# Altium footprint library 4764.PcbLib: 1 footprints
Each footprint in its own frame and in the unit in brackets; x right, y up, seen from the top. Pads: shape width x height; smd on the part's side, far side on the other; paste and mask are expansions set on the pad; w line width, h text height; cw(c..) or ccw(c..) is an arc to the next point about the centre after c.
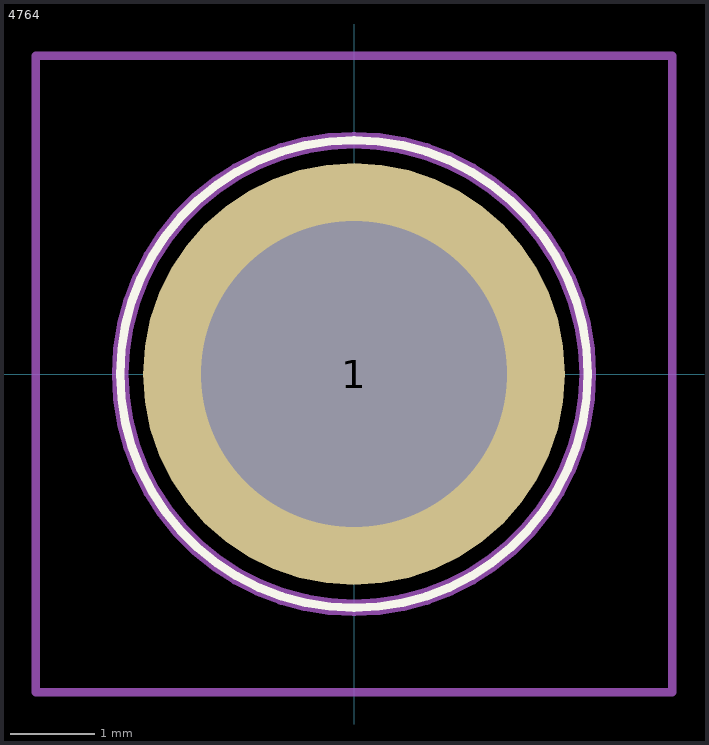
[diagram p0: the footprint, top view; thin cyan lines are the x and y axes]

## 4764 [mm]
pads (1):
  round 5 hole 3.63: 1(0,0)
Top Overlay:
  lines w0.1: 0,-2.77 ccw(c0,0) 0,2.77 ccw(c0,0) 0,-2.77
Mechanical 15:
  lines w0.2: 0,-2.77 ccw(c0,0) 0,2.77 ccw(c0,0) 0,-2.77
Mechanical 20:
  lines w0.1: -3.77,-3.77 -3.77,3.77 3.77,3.77 3.77,-3.77 -3.77,-3.77
3D body "476-4.stp": height 1.96, standoff -4.7, extent -2.757,-2.769 2.757,2.769